# Altium schematic symbol library MOUNTING HOLE - M3.SchLib: 1 symbol
Pins are listed as number, name and electrical type; pins without a type are passive.

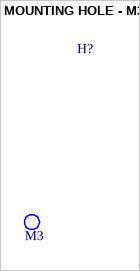
[diagram p0: symbol MOUNTING HOLE - M3]

## MOUNTING HOLE - M3
designator H?, comment M3
Mounting Hole without connection, M3
footprint M3 - HOLE (Huella M3 - HOLE)